# Altium schematic symbol library TBA 1-1211E.SchLib: 1 symbol
Pins are listed as number, name and electrical type; pins without a type are passive.

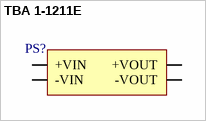
[diagram p0: symbol TBA 1-1211E]

## TBA 1-1211E
designator PS?
Converter: DC/DC; 1W; Uin: 10.8÷13.2VDC; Uout: 5VDC; Iout: 200mA
footprint TBA 1-1211E (Converter: DC/DC; 1W; Uin: 10.8÷13.2VDC; Uout: 5VDC; Iout: 200mA); pin to pad 3>4 4>6
pins: 1 +VIN (power), 2 -VIN (power), 3 -VOUT (power), 4 +VOUT (power)